# Altium schematic symbol library NTIR_Connectors.SchLib: 15 symbols
Pins are listed as number, name and electrical type; pins without a type are passive.

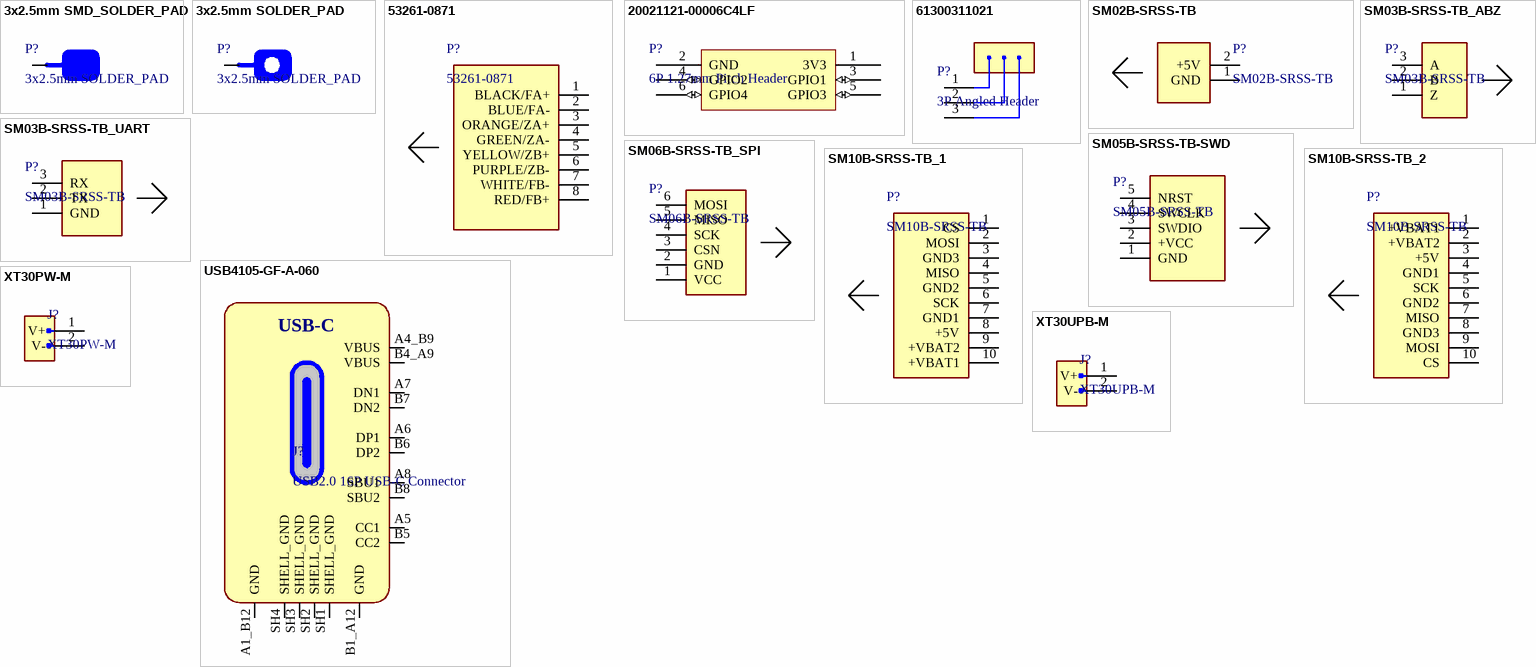
[diagram p0: symbols 3x2.5mm SMD_SOLDER_PAD to XT30UPB-M]

## 3x2.5mm SMD_SOLDER_PAD
designator P?, comment 3x2.5mm SOLDER_PAD
Plated SMD 3x2.5mm SOLDER_PAD
footprint SOLDER_PAD_SMD
pins: 1

## 3x2.5mm SOLDER_PAD
designator P?
Plated Through Hole 3x2.5mm SOLDER_PAD
footprint SOLDER_PAD
pins: 1

## 53261-0871
designator P?
1.25mm (.049") Pitch PicoBlade Header, Surface Mount, Right Angle, Lead-free, 8 Circuits; Manufacturer: Molex; Manufacturer Lifecycle Status: ACTIVE; Contact Resistance: 20mΩ; Current Rating: 1A; Gender: Male; Glow Wire Compliant: Non-compliant; Insulation Resistance: 100MΩ; Number of Circuits: 7; Number of Contacts: 8; Pitch: 1.2446mm; Plating: Tin; Plating Thickness: 990.6nm; Ratings: CSA; Voltage Rating: 125V; Supplier 1: DigiKey; Manufacturer Part Number: 53261-0871; RoHS: Compliant; Category: Headers and Wire Housings; Stock 1: 32917; Pricing 1: 1=0.91, 10=0.772, 100=0.6556, 500=0.58518 (USD); Ambient Temperature Range High: 105°C; China RoHS: Compliant; Color: Beige; Contact Material: Nickel, Tin; Contact Plating: Tin; Country of Origin: SG; Flammability Rating: UL94 V-0; Height: 3.6mm; Lead Free: Lead Free; Lead Pitch: 1.25mm; Lifecycle Status: Production; Max Operating Temperature: 105°C; Min Operating Temperature: -40°C; Mount: Surface Mount; Number of Pins: 8; Number of Positions: 8; Number of Rows: 1; Orientation: Right Angle; Packaging: Cut Tape; Radiation Hardening: No; REACH SVHC: Yes; Schedule B: 8536694040, 8536694040|8536694040|8536694040|8536694040|8536694040|8536694040|8536694040|8536694040|8536694040|8536694040|8536694040|8536694040|8536694040|8536694040|8536694040|8536694040|8536694040|8536694040|8536694040|8536694040|8536694040|8536694040|8536694040|85; Terminal Pitch: 1.25mm; Termination: Solder; Voltage Rating (AC): 125V; Voltage Rating (DC): 125V; Working Voltage: 125V; ComponentLink1URL: https://datasheet.octopart.com:443/53261-0871-Molex-datasheet-177725531.pdf?src-supplier=Farnell; ComponentLink1Description: https://datasheet.octopart.com:443/53261-0871-Molex-datasheet-177725531.pdf?src-supplier=Farnell; ComponentLink2URL: https://datasheet.octopart.com:443/53261-0871-Molex-datasheet-11023919.pdf?src-supplier=Farnell; ComponentLink2Description: https://datasheet.octopart.com:443/53261-0871-Molex-datasheet-11023919.pdf?src-supplier=Farnell; ComponentLink3URL: https://datasheet.octopart.com:443/53261-0871-Molex-datasheet-101583405.pdf?src-supplier=Farnell; ComponentLink3Description: https://datasheet.octopart.com:443/53261-0871-Molex-datasheet-101583405.pdf?src-supplier=Farnell; ComponentLink4URL: https://datasheet.octopart.com:443/532610871-Molex-datasheet-520094.pdf?src-supplier=Farnell; ComponentLink4Description: https://datasheet.octopart.com:443/532610871-Molex-datasheet-520094.pdf?src-supplier=Farnell; ComponentLink5URL: https://sigma.octopart.com:443/140425834/technical_drawing/Molex-53261-0871.pdf?src-supplier=Upverter; ComponentLink5Description: https://sigma.octopart.com:443/140425834/technical_drawing/Molex-53261-0871.pdf?src-supplier=Upverter; ComponentLink6URL: https://datasheet.octopart.com:443/53261-0871-Molex-datasheet-140462602.pdf?src-supplier=Upverter; ComponentLink6Description: https://datasheet.octopart.com:443/53261-0871-Molex-datasheet-140462602.pdf?src-supplier=Upverter; ComponentLink7URL: https://datasheet.octopart.com:443/53261-0871-Molex-datasheet-12537161.pdf?src-supplier=_legacy+Avnet; ComponentLink7Description: https://datasheet.octopart.com:443/53261-0871-Molex-datasheet-12537161.pdf?src-supplier=_legacy+Avnet; ComponentLink8URL: https://datasheet.octopart.com:443/532610871-Molex-datasheet-8343080.pdf?src-supplier=TME; ComponentLink8Description: https://datasheet.octopart.com:443/532610871-Molex-datasheet-8343080.pdf?src-supplier=TME; ComponentLink9URL: https://datasheet.octopart.com:443/53261-0871-Molex-datasheet-10404416.pdf?src-supplier=Molex; ComponentLink9Description: https://datasheet.octopart.com:443/53261-0871-Molex-datasheet-10404416.pdf?src-supplier=Molex; ComponentLink10URL: https://sigma.octopart.com:443/16413766/technical_drawing/Molex-53261-0871.pdf?src-supplier=Molex; ComponentLink10Description: https://sigma.octopart.com:443/16413766/technical_drawing/Molex-53261-0871.pdf?src-supplier=Molex; ComponentLink11URL: https://datasheet.octopart.com:443/53261-0871-Molex-datasheet-154756037.pdf?src-supplier=Master+Electronics; ComponentLink11Description: https://datasheet.octopart.com:443/53261-0871-Molex-datasheet-154756037.pdf?src-supplier=Master+Electronics; ComponentLink12URL: https://datasheet.octopart.com:443/53261-0871-Molex-datasheet-21208676.pdf?src-supplier=Electro+Sonic; ComponentLink12Description: https://datasheet.octopart.com:443/53261-0871-Molex-datasheet-21208676.pdf?src-supplier=Electro+Sonic; ComponentLink13URL: https://datasheet.octopart.com:443/53261-0871-Molex-datasheet-62105452.pdf?src-supplier=Electro+Sonic; ComponentLink13Description: https://datasheet.octopart.com:443/53261-0871-Molex-datasheet-62105452.pdf?src-supplier=Electro+Sonic; ComponentLink14URL: https://datasheet.octopart.com:443/53261-0871-Molex-datasheet-8522546.pdf?src-supplier=element14; ComponentLink14Description: https://datasheet.octopart.com:443/53261-0871-Molex-datasheet-8522546.pdf?src-supplier=element14; ComponentLink15URL: https://datasheet.octopart.com:443/53261-0871-Molex-datasheet-100429.pdf?src-supplier=element14; ComponentLink15Description: https://datasheet.octopart.com:443/53261-0871-Molex-datasheet-100429.pdf?src-supplier=element14; ComponentLink16URL: https://datasheet.octopart.com:443/0532610871-Molex-datasheet-157440116.pdf?src-supplier=Sager+Electronics; ComponentLink16Description: https://datasheet.octopart.com:443/0532610871-Molex-datasheet-157440116.pdf?src-supplier=Sager+Electronics; ComponentLink17URL: https://datasheet.octopart.com:443/53261-0871-Molex-datasheet-140186590.pdf?src-supplier=RS+(Formerly+Allied+Electronics); ComponentLink17Description: https://datasheet.octopart.com:443/53261-0871-Molex-datasheet-140186590.pdf?src-supplier=RS+(Formerly+Allied+Electronics); ComponentLink18URL: https://datasheet.octopart.com:443/53261-0871-Molex-datasheet-120153903.pdf?src-supplier=RS+(Formerly+Allied+Electronics); ComponentLink18Description: https://datasheet.octopart.com:443/53261-0871-Molex-datasheet-120153903.pdf?src-supplier=RS+(Formerly+Allied+Electronics); ComponentLink19URL: https://datasheet.octopart.com:443/53261-0871-Molex-datasheet-34442330.pdf?src-supplier=RS+(Formerly+Allied+Electronics); ComponentLink19Description: https://datasheet.octopart.com:443/53261-0871-Molex-datasheet-34442330.pdf?src-supplier=RS+(Formerly+Allied+Electronics); ComponentLink20URL: https://datasheet.octopart.com:443/532610871-Molex-datasheet-137316104.pdf?src-supplier=Future+Electronics; ComponentLink20Description: https://datasheet.octopart.com:443/532610871-Molex-datasheet-137316104.pdf?src-supplier=Future+Electronics; ComponentLink21URL: https://datasheet.octopart.com:443/53261-0871-Molex-datasheet-33003884.pdf?src-supplier=Newark; ComponentLink21Description: https://datasheet.octopart.com:443/53261-0871-Molex-datasheet-33003884.pdf?src-supplier=Newark; ComponentLink22URL: https://datasheet.octopart.com:443/53261-0871-Molex-datasheet-33003883.pdf?src-supplier=Newark; ComponentLink22Description: https://datasheet.octopart.com:443/53261-0871-Molex-datasheet-33003883.pdf?src-supplier=Newark; ComponentLink23URL: https://datasheet.octopart.com:443/0532610871-Molex-datasheet-11889475.pdf?src-supplier=Arrow+Electronics; ComponentLink23Description: https://datasheet.octopart.com:443/0532610871-Molex-datasheet-11889475.pdf?src-supplier=Arrow+Electronics; ComponentLink24URL: https://datasheet.octopart.com:443/53261-0871-Molex-datasheet-17741852.pdf?src-supplier=Jameco+(USA); ComponentLink24Description: https://datasheet.octopart.com:443/53261-0871-Molex-datasheet-17741852.pdf?src-supplier=Jameco+(USA); ComponentLink25URL: https://datasheet.octopart.com:443/53261-0871-Molex-datasheet-145971.pdf?src-supplier=DigiKey; ComponentLink25Description: https://datasheet.octopart.com:443/53261-0871-Molex-datasheet-145971.pdf?src-supplier=DigiKey; ComponentLink26URL: http://sigma.octopart.com:80/16413779/rohs_statement/Molex-53261-0871.pdf?src-supplier=Compliance+Statements; ComponentLink26Description: http://sigma.octopart.com:80/16413779/rohs_statement/Molex-53261-0871.pdf?src-supplier=Compliance+Statements; ComponentLink27URL: http://sigma.octopart.com:80/reach_statement/Molex-company-74.pdf?src-supplier=Compliance+Statements; ComponentLink27Description: http://sigma.octopart.com:80/reach_statement/Molex-company-74.pdf?src-supplier=Compliance+Statements; ComponentLink28URL: http://sigma.octopart.com:80/rohs_statement/Molex-company-73.pdf?src-supplier=Compliance+Statements; ComponentLink28Description: http://sigma.octopart.com:80/rohs_statement/Molex-company-73.pdf?src-supplier=Compliance+Statements; ComponentLink29URL: http://sigma.octopart.com:80/conflict_mineral_statement/Molex-company-72.pdf?src-supplier=Compliance+Statements; ComponentLink29Description: http://sigma.octopart.com:80/conflict_mineral_statement/Molex-company-72.pdf?src-supplier=Compliance+Statements; Supplier Part Number 1: WM7626CT-ND
footprint FP-532610871-MFG
pins: 1 BLACK/FA+, 2 BLUE/FA-, 3 ORANGE/ZA+, 4 GREEN/ZA-, 5 YELLOW/ZB+, 6 PURPLE/ZB-, 7 WHITE/FB-, 8 RED/FB+

## 20021121-00006C4LF
designator P?, comment 6P 1.27mm Pitch Header
Pin Header, Vertical, Board-to-Board, 1.27 mm, 2 Rows, 6 Contacts, Surface Mount Straight; Manufacturer: Amphenol Communications Solutions; Manufacturer Part Number: 20021121-00006C4LF; Connector Type: Header, Male Pin; Contact Resistance: 30mΩ; Current Rating: 1A; Dielectric Material: Polyethylene; Gender: Male; Insulation Resistance: 100MΩ; Mating Post Length: 3.05mm; Max Voltage Rating (AC): 125V; Number of Contacts: 6; Operating Force: 2.1406N; Plating Thickness: 254nm; Row Spacing: 3.9116mm; Stack Height: 3mm; Supplier 1: DigiKey; RoHS: Compliant; Category: Headers and Wire Housings; Stock 1: 95236; Pricing 1: 1=0.64, 10=0.544, 100=0.4618 (USD); China RoHS: Compliant; Color: Black; Contact Material: Gold; Contact Mating Length: 3.048mm; Contact Plating: Gold; Depth: 3.4mm; Export Control Classification Number (ECCN) Code: EAR99; Height: 5.05mm; Housing Color: Black; Housing Material: Thermoplastic; Harmonized Tariff Schedule (HTS) Code: 8536.69.40.40; Insulation Color: Black; Introduction Date: 2010-01-29; Length: 3.81mm; Lifecycle Status: Production; Max Operating Temperature: 105°C; Min Operating Temperature: -40°C; Mount: Surface Mount; Number of Pins: 6; Number of Positions: 6; Number of Rows: 2; Orientation: Straight; Pitch: 1.27mm; Radiation Hardening: No; REACH SVHC: Yes; Terminal Pitch: 1.27mm; Termination: Solder; Voltage Rating: 125V; ComponentLink1URL: https://datasheet.octopart.com:443/20021121-00006C4LF-Amphenol-Communications-Solutions-datasheet-102830508.pdf?src-supplier=Electro+Sonic; ComponentLink1Description: https://datasheet.octopart.com:443/20021121-00006C4LF-Amphenol-Communications-Solutions-datasheet-102830508.pdf?src-supplier=Electro+Sonic; ComponentLink2URL: https://datasheet.octopart.com:443/20021121-00006C4LF-Amphenol-Communications-Solutions-datasheet-21379658.pdf?src-supplier=Farnell; ComponentLink2Description: https://datasheet.octopart.com:443/20021121-00006C4LF-Amphenol-Communications-Solutions-datasheet-21379658.pdf?src-supplier=Farnell; ComponentLink3URL: https://datasheet.octopart.com:443/20021121-00006C4LF-Amphenol-Communications-Solutions-datasheet-62305862.pdf?src-supplier=Farnell; ComponentLink3Description: https://datasheet.octopart.com:443/20021121-00006C4LF-Amphenol-Communications-Solutions-datasheet-62305862.pdf?src-supplier=Farnell; ComponentLink4URL: https://datasheet.octopart.com:443/20021121-00006C4LF-FCI-datasheet-17852665.pdf?src-supplier=Farnell; ComponentLink4Description: https://datasheet.octopart.com:443/20021121-00006C4LF-FCI-datasheet-17852665.pdf?src-supplier=Farnell; ComponentLink5URL: https://datasheet.octopart.com:443/20021121-00006C4LF-Amphenol-Communications-Solutions-datasheet-98396828.pdf?src-supplier=element14+APAC; ComponentLink5Description: https://datasheet.octopart.com:443/20021121-00006C4LF-Amphenol-Communications-Solutions-datasheet-98396828.pdf?src-supplier=element14+APAC; ComponentLink6URL: https://datasheet.octopart.com:443/20021121-00006C4LF-FCI-datasheet-8699946.pdf?src-supplier=element14+APAC; ComponentLink6Description: https://datasheet.octopart.com:443/20021121-00006C4LF-FCI-datasheet-8699946.pdf?src-supplier=element14+APAC; ComponentLink7URL: https://datasheet.octopart.com:443/20021121-00006C4LF-FCI-datasheet-8640585.pdf?src-supplier=element14+APAC; ComponentLink7Description: https://datasheet.octopart.com:443/20021121-00006C4LF-FCI-datasheet-8640585.pdf?src-supplier=element14+APAC; ComponentLink8URL: https://datasheet.octopart.com:443/20021121-00006C4LF-FCI-datasheet-13726100.pdf?src-supplier=_legacy+Avnet; ComponentLink8Description: https://datasheet.octopart.com:443/20021121-00006C4LF-FCI-datasheet-13726100.pdf?src-supplier=_legacy+Avnet; ComponentLink9URL: https://datasheet.octopart.com:443/20021121-00006C4LF-FCI-datasheet-11547764.pdf?src-supplier=Arrow+Electronics; ComponentLink9Description: https://datasheet.octopart.com:443/20021121-00006C4LF-FCI-datasheet-11547764.pdf?src-supplier=Arrow+Electronics; Supplier Part Number 1: 609-3693-1-ND
footprint AMPHENOL_20021121-00006T4LF
pins: 1 3V3 (power), 2 GND (power), 3 GPIO1 (io), 4 GPIO2 (io), 5 GPIO3 (io), 6 GPIO4 (io)

## 61300311021
designator P?, comment 3P Angled Header
THT Angled Pin Header WR-PHD, Pitch 2.54 mm, Single Row, 3 pins; Manufacturer: Wurth Elektronik; Manufacturer Part Number: 61300311021; Connector Type: Male Pin; Contact Resistance: 20mΩ; Current Rating: 3A; Gender: Male; Number of Contacts: 3; Operating Supply Voltage: 250V; Pitch: 2.54mm; Supplier 1: DigiKey; RoHS: Compliant; Category: Headers and Wire Housings; Stock 1: 3274; Pricing 1: 1=0.36, 10=0.302, 25=0.252, 50=0.2106, 100=0.1908, 1000=0.17375 (USD); Color: Black; Contact Material: Copper; Contact Mating Length: 5.9944mm; Contact Plating: Gold; Lead Pitch: 2.54mm; Mount: Through Hole; Number of Pins: 3; Number of Positions: 3; Number of Rows: 1; Packaging: Bulk; Termination: Solder; ComponentLink1URL: https://datasheet.octopart.com:443/61300311021-W%C3%BCrth-Elektronik-datasheet-111087939.pdf?src-supplier=Wurth+Elektronik; ComponentLink1Description: https://datasheet.octopart.com:443/61300311021-W%C3%BCrth-Elektronik-datasheet-111087939.pdf?src-supplier=Wurth+Elektronik; ComponentLink2URL: https://datasheet.octopart.com:443/61300311021-W%C3%BCrth-Elektronik-datasheet-149524046.pdf?src-supplier=Farnell; ComponentLink2Description: https://datasheet.octopart.com:443/61300311021-W%C3%BCrth-Elektronik-datasheet-149524046.pdf?src-supplier=Farnell; ComponentLink3URL: https://datasheet.octopart.com:443/61300311021-W%C3%BCrth-Elektronik-datasheet-10413528.pdf?src-supplier=Newark; ComponentLink3Description: https://datasheet.octopart.com:443/61300311021-W%C3%BCrth-Elektronik-datasheet-10413528.pdf?src-supplier=Newark
footprint 61300311021
pins: 1, 2, 3

## SM02B-SRSS-TB
designator P?
Board Connector, 2 Contact(s), 1 Row(s), Male, Right Angle, Surface Mount Terminal; Manufacturer: JST; Connector Type: Male Pin; Number of Contacts: 2; Pitch: 1mm; Supplier 1: DigiKey; Manufacturer Part Number: SM02B-SRSS-TB; RoHS: Compliant; Category: Card Edge Connectors; Stock 1: 48272; Pricing 1: 1=0.38, 10=0.325, 100=0.2759, 500=0.2462, 1000=0.23443 (USD); Color: Natural; Contact Plating: Tin; Gender: Male; Housing Color: Natural; Housing Material: Nylon; Lead Free: Contains Lead; Lifecycle Status: Obsolete; Max Operating Temperature: 85°C; Min Operating Temperature: -25°C; Mount: Surface Mount; Number of Pins: 2; Number of Positions: 2; Number of Rows: 1; Orientation: Right Angle; Terminal Pitch: 1mm; Termination: Solder; ComponentLink1URL: https://datasheet.octopart.com:443/SM02B-SRSS-TB-JST-datasheet-12513377.pdf?src-supplier=Upverter; ComponentLink1Description: https://datasheet.octopart.com:443/SM02B-SRSS-TB-JST-datasheet-12513377.pdf?src-supplier=Upverter; ComponentLink2URL: https://datasheet.octopart.com:443/SM02B-SRSS-TB-JST-datasheet-180492086.pdf?src-supplier=IHS; ComponentLink2Description: https://datasheet.octopart.com:443/SM02B-SRSS-TB-JST-datasheet-180492086.pdf?src-supplier=IHS; ComponentLink3URL: https://datasheet.octopart.com:443/SM02B-SRSS-TB-JST-datasheet-44103209.pdf?src-supplier=TME; ComponentLink3Description: https://datasheet.octopart.com:443/SM02B-SRSS-TB-JST-datasheet-44103209.pdf?src-supplier=TME; ComponentLink4URL: https://datasheet.octopart.com:443/SM02B-SRSS-TB-JST-datasheet-118603.pdf?src-supplier=DigiKey; ComponentLink4Description: https://datasheet.octopart.com:443/SM02B-SRSS-TB-JST-datasheet-118603.pdf?src-supplier=DigiKey; Supplier Part Number 1: 455-SM02B-SRSS-TBCT-ND
footprint SM02B-SRSS-TB
pins: 1 GND, 2 +5V

## SM03B-SRSS-TB_ABZ
designator P?, comment SM03B-SRSS-TB
Board Connector, 3 Contact(s), 1 Row(s), Male, Right Angle, Surface Mount Terminal; Manufacturer: JST; Connector Type: Male Pin; Number of Contacts: 3; Pitch: 990.6µm; Supplier 1: DigiKey; Manufacturer Part Number: SM03B-SRSS-TB; RoHS: Compliant; Category: Card Edge Connectors; Stock 1: 14167; Pricing 1: 1=0.44, 10=0.373, 100=0.317, 500=0.2829, 1000=0.26938 (USD); Color: Natural; Contact Gender: Male; Contact Plating: Tin; Housing Color: Natural; Housing Material: Nylon; Lead Free: Contains Lead; Lifecycle Status: Obsolete; Max Operating Temperature: 85°C; Min Operating Temperature: -25°C; Mount: Surface Mount; Number of Pins: 3; Number of Positions: 3; Number of Rows: 1; Orientation: Horizontal; Terminal Pitch: 1mm; Termination: Solder; ComponentLink1URL: https://datasheet.octopart.com:443/SM03B-SRSS-TB-JST-datasheet-180492086.pdf?src-supplier=IHS; ComponentLink1Description: https://datasheet.octopart.com:443/SM03B-SRSS-TB-JST-datasheet-180492086.pdf?src-supplier=IHS; ComponentLink2URL: https://datasheet.octopart.com:443/SM03B-SRSS-TB-JST-datasheet-44103209.pdf?src-supplier=TME; ComponentLink2Description: https://datasheet.octopart.com:443/SM03B-SRSS-TB-JST-datasheet-44103209.pdf?src-supplier=TME; ComponentLink3URL: https://datasheet.octopart.com:443/SM03B-SRSS-TB-JST-datasheet-118603.pdf?src-supplier=DigiKey; ComponentLink3Description: https://datasheet.octopart.com:443/SM03B-SRSS-TB-JST-datasheet-118603.pdf?src-supplier=DigiKey; ComponentLink4URL: https://datasheet.octopart.com:443/SM03B-SRSS-TB-JST-datasheet-152738602.pdf?src-supplier=Amar+Radio+Corporation; ComponentLink4Description: https://datasheet.octopart.com:443/SM03B-SRSS-TB-JST-datasheet-152738602.pdf?src-supplier=Amar+Radio+Corporation
footprint SM03B-SRSS-TB
pins: 1 Z, 2 B, 3 A

## SM03B-SRSS-TB_UART
designator P?, comment SM03B-SRSS-TB
Board Connector, 3 Contact(s), 1 Row(s), Male, Right Angle, Surface Mount Terminal; Manufacturer: JST; Connector Type: Male Pin; Number of Contacts: 3; Pitch: 990.6µm; Supplier 1: DigiKey; Manufacturer Part Number: SM03B-SRSS-TB; RoHS: Compliant; Category: Card Edge Connectors; Stock 1: 14167; Pricing 1: 1=0.44, 10=0.373, 100=0.317, 500=0.2829, 1000=0.26938 (USD); Color: Natural; Contact Gender: Male; Contact Plating: Tin; Housing Color: Natural; Housing Material: Nylon; Lead Free: Contains Lead; Lifecycle Status: Obsolete; Max Operating Temperature: 85°C; Min Operating Temperature: -25°C; Mount: Surface Mount; Number of Pins: 3; Number of Positions: 3; Number of Rows: 1; Orientation: Horizontal; Terminal Pitch: 1mm; Termination: Solder; ComponentLink1URL: https://datasheet.octopart.com:443/SM03B-SRSS-TB-JST-datasheet-180492086.pdf?src-supplier=IHS; ComponentLink1Description: https://datasheet.octopart.com:443/SM03B-SRSS-TB-JST-datasheet-180492086.pdf?src-supplier=IHS; ComponentLink2URL: https://datasheet.octopart.com:443/SM03B-SRSS-TB-JST-datasheet-44103209.pdf?src-supplier=TME; ComponentLink2Description: https://datasheet.octopart.com:443/SM03B-SRSS-TB-JST-datasheet-44103209.pdf?src-supplier=TME; ComponentLink3URL: https://datasheet.octopart.com:443/SM03B-SRSS-TB-JST-datasheet-118603.pdf?src-supplier=DigiKey; ComponentLink3Description: https://datasheet.octopart.com:443/SM03B-SRSS-TB-JST-datasheet-118603.pdf?src-supplier=DigiKey; ComponentLink4URL: https://datasheet.octopart.com:443/SM03B-SRSS-TB-JST-datasheet-152738602.pdf?src-supplier=Amar+Radio+Corporation; ComponentLink4Description: https://datasheet.octopart.com:443/SM03B-SRSS-TB-JST-datasheet-152738602.pdf?src-supplier=Amar+Radio+Corporation
footprint SM03B-SRSS-TB
pins: 1 GND, 2 TX, 3 RX

## SM05B-SRSS-TB-SWD
designator P?, comment SM05B-SRSS-TB
Board Connector, 5 Contact(s), 1 Row(s), Male, Right Angle, Surface Mount Terminal; Manufacturer: JST; Connector Type: Male Pin; Number of Contacts: 5; Pitch: 990.6µm; Supplier 1: DigiKey; Manufacturer Part Number: SM05B-SRSS-TB; RoHS: Compliant; Category: Card Edge Connectors; Stock 1: 42194; Pricing 1: 1=0.62, 10=0.527, 100=0.4477, 500=0.3996, 1000=0.38051 (USD); Color: Natural; Contact Plating: Tin; Export Control Classification Number (ECCN) Code: EAR99; Gender: Male; Housing Color: Natural; Housing Material: Nylon; Harmonized Tariff Schedule (HTS) Code: 8536.69.40.40; Introduction Date: 1996-04-01; Lead Free: Contains Lead; Lifecycle Status: Obsolete; Mount: Surface Mount; Number of Positions: 5; Number of Rows: 1; Orientation: Right Angle; Terminal Pitch: 1mm; Termination: Solder; ComponentLink1URL: https://datasheet.octopart.com:443/SM05B-SRSS-TB-JST-datasheet-180492086.pdf?src-supplier=IHS; ComponentLink1Description: https://datasheet.octopart.com:443/SM05B-SRSS-TB-JST-datasheet-180492086.pdf?src-supplier=IHS; ComponentLink2URL: https://datasheet.octopart.com:443/SM05B-SRSS-TB-JST-datasheet-118603.pdf?src-supplier=DigiKey; ComponentLink2Description: https://datasheet.octopart.com:443/SM05B-SRSS-TB-JST-datasheet-118603.pdf?src-supplier=DigiKey; ComponentLink3URL: https://datasheet.octopart.com:443/SM05B-SRSS-TB-JST-datasheet-152738602.pdf?src-supplier=Amar+Radio+Corporation; ComponentLink3Description: https://datasheet.octopart.com:443/SM05B-SRSS-TB-JST-datasheet-152738602.pdf?src-supplier=Amar+Radio+Corporation
footprint SM05B-SRSS-TB
pins: 1 GND, 2 +VCC, 3 SWDIO, 4 SWCLK, 5 NRST

## SM06B-SRSS-TB_SPI
designator P?, comment SM06B-SRSS-TB
Board Connector, 6 Contact(s), 1 Row(s), Male, Right Angle, 0.039 inch Pitch, Surface Mount Terminal; Manufacturer: JST; Connector Type: Male Pin; Dielectric Material: Polyamide; Number of Contacts: 6; Pitch: 990.6µm; Supplier 1: DigiKey; Manufacturer Part Number: SM06B-SRSS-TB; RoHS: Compliant; Category: Card Edge Connectors; Stock 1: 26532; Pricing 1: 1=0.67, 10=0.567, 100=0.4821, 500=0.43024, 1000=0.40969 (USD); Color: Natural; Contact Gender: Male; Contact Plating: Tin; Housing Color: Natural; Housing Material: Nylon; Lead Free: Contains Lead; Lifecycle Status: Obsolete; Max Operating Temperature: 85°C; Manufacturer Package Identifier: SM06B-SRSS-TB; Min Operating Temperature: -25°C; Mount: Surface Mount; Number of Pins: 6; Number of Positions: 6; Number of Rows: 1; Orientation: Horizontal; Terminal Pitch: 1mm; Termination: Solder; ComponentLink1URL: https://datasheet.octopart.com:443/SM06B-SRSS-TB-JST-datasheet-118603.pdf?src-supplier=Upverter; ComponentLink1Description: https://datasheet.octopart.com:443/SM06B-SRSS-TB-JST-datasheet-118603.pdf?src-supplier=Upverter; ComponentLink2URL: https://datasheet.octopart.com:443/SM06B-SRSS-TB-JST-datasheet-180492086.pdf?src-supplier=IHS; ComponentLink2Description: https://datasheet.octopart.com:443/SM06B-SRSS-TB-JST-datasheet-180492086.pdf?src-supplier=IHS; ComponentLink3URL: https://datasheet.octopart.com:443/SM06B-SRSS-TB-JST-datasheet-44103209.pdf?src-supplier=TME; ComponentLink3Description: https://datasheet.octopart.com:443/SM06B-SRSS-TB-JST-datasheet-44103209.pdf?src-supplier=TME; ComponentLink4URL: https://datasheet.octopart.com:443/SM06B-SRSS-TB-JST-datasheet-152738602.pdf?src-supplier=Amar+Radio+Corporation; ComponentLink4Description: https://datasheet.octopart.com:443/SM06B-SRSS-TB-JST-datasheet-152738602.pdf?src-supplier=Amar+Radio+Corporation
footprint SM06B-SRSS-TB
pins: 1 VCC, 2 GND, 3 CSN, 4 SCK, 5 MISO, 6 MOSI

## SM10B-SRSS-TB_1
designator P?, comment SM10B-SRSS-TB
Board Connector, 10 Contact(s), 1 Row(s), Male, Right Angle, Surface Mount Terminal; Manufacturer: JST; Connector Type: Male Pin; Number of Contacts: 10; Pitch: 990.6µm; Supplier 1: DigiKey; Manufacturer Part Number: SM10B-SRSS-TB; RoHS: Compliant; Category: Card Edge Connectors; Stock 1: 3469; Pricing 1: 1=0.93, 10=0.788, 100=0.6694, 500=0.59746, 1000=0.56894 (USD); Color: Natural; Contact Plating: Tin; Export Control Classification Number (ECCN) Code: EAR99; Gender: Male; Housing Color: Natural; Housing Material: Nylon; Harmonized Tariff Schedule (HTS) Code: 8536.69.40.40; Introduction Date: 1996-04-01; Lead Free: Contains Lead; Lifecycle Status: Obsolete; Mount: Surface Mount; Number of Pins: 10; Number of Positions: 10; Number of Rows: 1; Orientation: Right Angle; Terminal Pitch: 1mm; Termination: Solder; ComponentLink1URL: https://datasheet.octopart.com:443/SM10B-SRSS-TB-JST-datasheet-180492086.pdf?src-supplier=IHS; ComponentLink1Description: https://datasheet.octopart.com:443/SM10B-SRSS-TB-JST-datasheet-180492086.pdf?src-supplier=IHS; ComponentLink2URL: https://datasheet.octopart.com:443/SM10B-SRSS-TB-JST-datasheet-118603.pdf?src-supplier=DigiKey; ComponentLink2Description: https://datasheet.octopart.com:443/SM10B-SRSS-TB-JST-datasheet-118603.pdf?src-supplier=DigiKey
footprint SM10B-SRSS-TB
pins: 1 CS, 2 MOSI, 3 GND3, 4 MISO, 5 GND2, 6 SCK, 7 GND1, 8 +5V, 9 +VBAT2, 10 +VBAT1

## SM10B-SRSS-TB_2
designator P?, comment SM10B-SRSS-TB
Board Connector, 10 Contact(s), 1 Row(s), Male, Right Angle, Surface Mount Terminal; Manufacturer: JST; Connector Type: Male Pin; Number of Contacts: 10; Pitch: 990.6µm; Supplier 1: DigiKey; Manufacturer Part Number: SM10B-SRSS-TB; RoHS: Compliant; Category: Card Edge Connectors; Stock 1: 3469; Pricing 1: 1=0.93, 10=0.788, 100=0.6694, 500=0.59746, 1000=0.56894 (USD); Color: Natural; Contact Plating: Tin; Export Control Classification Number (ECCN) Code: EAR99; Gender: Male; Housing Color: Natural; Housing Material: Nylon; Harmonized Tariff Schedule (HTS) Code: 8536.69.40.40; Introduction Date: 1996-04-01; Lead Free: Contains Lead; Lifecycle Status: Obsolete; Mount: Surface Mount; Number of Pins: 10; Number of Positions: 10; Number of Rows: 1; Orientation: Right Angle; Terminal Pitch: 1mm; Termination: Solder; ComponentLink1URL: https://datasheet.octopart.com:443/SM10B-SRSS-TB-JST-datasheet-180492086.pdf?src-supplier=IHS; ComponentLink1Description: https://datasheet.octopart.com:443/SM10B-SRSS-TB-JST-datasheet-180492086.pdf?src-supplier=IHS; ComponentLink2URL: https://datasheet.octopart.com:443/SM10B-SRSS-TB-JST-datasheet-118603.pdf?src-supplier=DigiKey; ComponentLink2Description: https://datasheet.octopart.com:443/SM10B-SRSS-TB-JST-datasheet-118603.pdf?src-supplier=DigiKey
footprint SM10B-SRSS-TB
pins: 1 +VBAT1, 2 +VBAT2, 3 +5V, 4 GND1, 5 SCK, 6 GND2, 7 MISO, 8 GND3, 9 MOSI, 10 CS

## USB4105-GF-A-060
designator J?, comment USB2.0 16P USB-C Connector
USB-C (USB TYPE-C) USB 2.0 Receptacle Connector 24 (16+8 Dummy) Position Surface Mount, Right Angle; Through Hole; MF: Global Connector Technology; MP: USB4105GFA060; SnapEDA_Link: https://www.snapeda.com/parts/USB4105GFA060/Global+Connector+Technology/view-part/?ref=snap; Package: None; Value: *; Check_prices: https://www.snapeda.com/parts/USB4105GFA060/Global+Connector+Technology/view-part/?ref=eda
footprint USBC_GCT_USB4105-GF-A-060
pins: A1_B12 GND, A4_B9 VBUS, A5 CC1, A6 DP1, A7 DN1, A8 SBU1, B1_A12 GND, B4_A9 VBUS, B5 CC2, B6 DP2, B7 DN2, B8 SBU2, SH1 SHELL_GND, SH2 SHELL_GND, SH3 SHELL_GND, SH4 SHELL_GND
text: USB-C

## XT30PW-M
designator J?
Socket; DC supply; XT30; male; PIN: 2; on PCBs; THT; Colour: yellow; MF: AMASS; SnapEDA_Link: https://www.snapeda.com/parts/XT30PW-M/AMASS/view-part/?ref=snap; Package: None; Value: *; MP: XT30PW-M; Check_prices: https://www.snapeda.com/parts/XT30PW-M/AMASS/view-part/?ref=eda
footprint AMASS_XT30PW-M
pins: 1 V+ (power), 2 V- (power)

## XT30UPB-M
designator J?
Socket; DC supply; XT30; male; PIN: 2; on PCBs; THT; Colour: yellow; MF: AMASS; SnapEDA_Link: https://www.snapeda.com/parts/XT30PW-M/AMASS/view-part/?ref=snap; Package: None; Value: *; MP: XT30UPB-M; Check_prices: https://www.snapeda.com/parts/XT30PW-M/AMASS/view-part/?ref=eda
footprint AMASS_XT30UPB-M
pins: 1 V+ (power), 2 V- (power)